# Altium schematic symbol library LAN8720A-CP.SchLib: 1 symbol
Pins are listed as number, name and electrical type; pins without a type are passive.

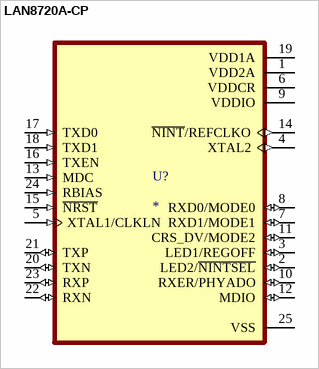
[diagram p0: symbol LAN8720A-CP]

## LAN8720A-CP
designator U?
2/2 Transceiver Full MII, RMII 24-QFN (4x4); MF: Microchip; MP: LAN8720A-CP-TR; SnapEDA_Link: https://www.snapeda.com/parts/LAN8720A-CP-TR/Microchip+Technology/view-part/?ref=snap; Package: VFQFN-24 Microchip Technology; Value: *; Check_prices: https://www.snapeda.com/parts/LAN8720A-CP-TR/Microchip+Technology/view-part/?ref=eda
footprint QFN50P400X400X100-25N
pins: 1 VDD2A (power), 2 LED2/~{NINTSEL} (io), 3 LED1/REGOFF (io), 4 XTAL2 (out), 5 XTAL1/CLKLN (in), 6 VDDCR (power), 7 RXD1/MODE1 (io), 8 RXD0/MODE0 (io), 9 VDDIO (power), 10 RXER/PHYADO (io), 11 CRS_DV/MODE2 (io), 12 MDIO (io), 13 MDC (in), 14 ~{NINT}/REFCLKO (out), 15 ~{NRST} (in), 16 TXEN (in), 17 TXD0 (in), 18 TXD1 (in), 19 VDD1A (power), 20 TXN (io), 21 TXP (io), 22 RXN (io), 23 RXP (io), 24 RBIAS (in), 25 VSS (power)